# Altium integrated library OmniCore_SDR.IntLib: 98 symbols (part 2 of 2)
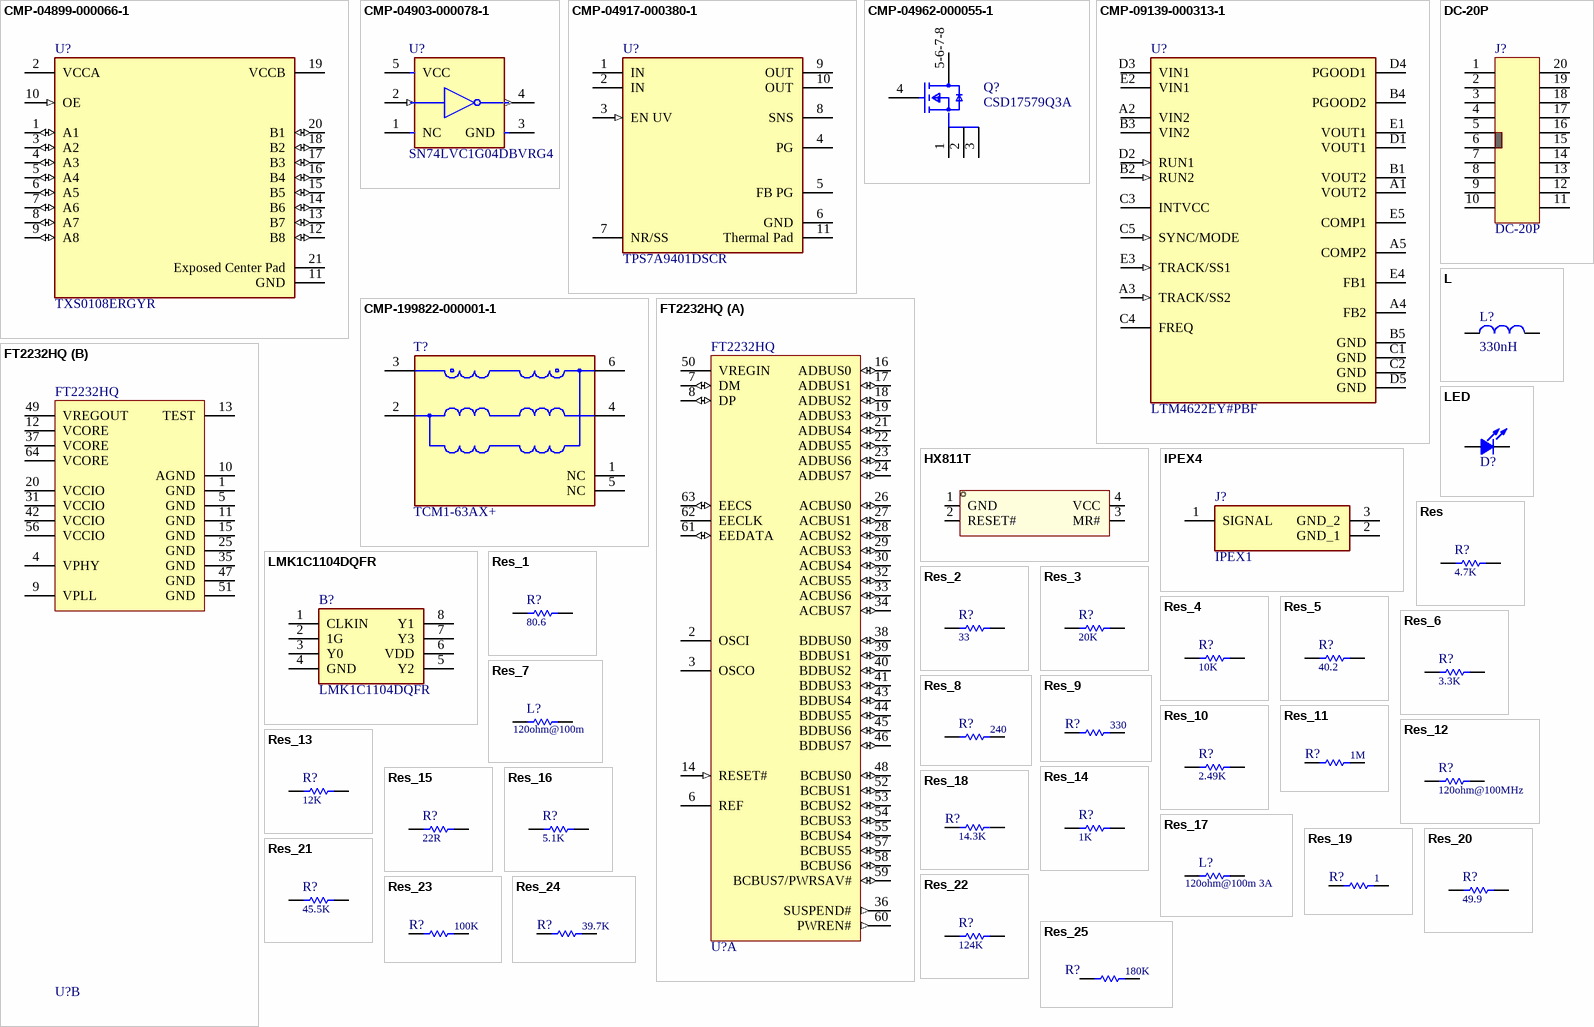
[diagram p5: symbols CMP-04899-000066-1 to Res_25]

## CMP-199822-000001-1
designator T?, comment TCM1-63AX+
1:1 CORE & WIRE Transformer, 10 - 6000 MHz, 50Ω; Manufacturer: Mini-Circuits; Insertion Loss: 1.16-1.8dB; Return Loss: 9.42-16.9dB; Lead Free: Yes; Device Class L3: unset; Temperature: -40°C to +85°C; Manufacturer Part Number: TCM1-63AX+; Frequency: 10-6000MHz; Device Class L2: Transformers; RoHS: TRUE; Octopart: https://octopart.com/tcm1-63ax%2B-mini-circuits-107315723; Temperature Range Low: -40°C; Category: Trans; Package: 0; ComponentLink2URL: https://www.minicircuits.com/pdfs/TCM1-63AX+.pdf; ComponentLink2Description: Datasheet; Automotive: No; Height: 4.06mm; Device Class L1: Passive Components; Temperature Range High: +85°C; Turns Ratio: 1:1
footprint FP-TCM1-63AX+-MFG
pins: 1 NC, 2 GND, 3 PRIMARY DOT, 4 SECONDARY, 5 NC, 6 SECONDARY DOT

## DC-20P
designator J?
footprint DC-20P
footprint HDR-TH_20P-P2.54-V-M-R2-C10-S2.54
pins: 1, 2, 3, 4, 5, 6, 7, 8, 9, 10, 11, 12, 13, 14, 15, 16, 17, 18, 19, 20

## FT2232HQ
designator U?
Dual High Speed USB to Multipurpose UART / FIFO IC / , 3 to 3.6 V, -40 to 85 degC, 64- Pin LQFP, RoHS; Manufacturer: FTDI; Number of Channels per Chip: 2; Standard Supported: RS232,RS422,RS485; Maximum Data Rate: 480Mbit/s; Package Description: 64-Pin Low-profile Quad Flat Package, Body 10 x 10 mm, Pitch 0.5 mm; Maximum Operating Temperature: +85°C; Mounting Technology: SurfaceMount; Pin Count: 64; Package Reference: LQFP-64; Manufacturer URL: http://www.nxp.com/; Length: 10mm; Width: 10mm; Minimum Operating Temperature: -40°C; Dimensions: 10x10x1.4mm; Package Type: LQFP; Mounting Type: SurfaceMount; Datasheet URL: http://www.ftdichip.com/Support/Documents/DataSheets/ICs/DS_FT2232H.pdf; Datasheet Version: Rev. 2.5, 07/2016; Height: 1.4mm
footprint QFN50P900X900X90-65N-D
part A pins: 2 OSCI "Oscillator input.", 3 OSCO "Oscillator output.", 6 REF "Current reference - connect via a 12Kohm resistor @ 1% to GND.", 7 DM (io) "USB Data Signal Minus.", 8 DP (io) "USB Data Signal Plus.", 14 RESET# (in) "Reset input (active low).", 16 ADBUS0 (io) "D0 bidirectional FIFO data", 17 ADBUS1 (io) "D1 bidirectional FIFO data", 18 ADBUS2 (io) "D2 bidirectional FIFO data", 19 ADBUS3 (io) "D3 bidirectional FIFO data", 21 ADBUS4 (io) "D4 bidirectional FIFO data", 22 ADBUS5 (io) "D5 bidirectional FIFO data", 23 ADBUS6 (io) "D6 bidirectional FIFO data", 24 ADBUS7 (io) "D7 bidirectional FIFO data", 26 ACBUS0 (io) "C0 bidirectional FIFO data", 27 ACBUS1 (io) "C1 bidirectional FIFO data", 28 ACBUS2 (io) "C2 bidirectional FIFO data", 29 ACBUS3 (io) "C3 bidirectional FIFO data", 30 ACBUS4 (io) "C4 bidirectional FIFO data", 32 ACBUS5 (io) "C5 bidirectional FIFO data", 33 ACBUS6 (io) "C6 bidirectional FIFO data", 34 ACBUS7 (io) "C7 bidirectional FIFO data", 36 SUSPEND# (out) "Active low when USB is in suspend mode.", 38 BDBUS0 (io) "D0 bidirectional FIFO data", 39 BDBUS1 (io) "D1 bidirectional FIFO data", 40 BDBUS2 (io) "D2 bidirectional FIFO data", 41 BDBUS3 (io) "D3 bidirectional FIFO data", 43 BDBUS4 (io) "D4 bidirectional FIFO data", 44 BDBUS5 (io) "D5 bidirectional FIFO data", 45 BDBUS6 (io) "D6 bidirectional FIFO data", 46 BDBUS7 (io) "D7 bidirectional FIFO data", 48 BCBUS0 (io) "C0 bidirectional FIFO data", 50 VREGIN (power) "+3.3V Input. Integrated 1.8V voltage regulator input.", 52 BCBUS1 (io) "C1 bidirectional FIFO data", 53 BCBUS2 (io) "C2 bidirectional FIFO data", 54 BCBUS3 (io) "C3 bidirectional FIFO data", 55 BCBUS4 (io) "C4 bidirectional FIFO data", 57 BCBUS5 (io) "C5 bidirectional FIFO data", 58 BCBUS6 (io) "C6 bidirectional FIFO data", 59 BCBUS7/PWRSAV# (io), 60 PWREN# (out) "Active low power-enable output.", 61 EEDATA (io) "EEPROM - Data I/O Connect directly to Data-In of the EEPROM and to Data-Out of the EEPROM via a 2.2K resistor. Also, pull Data-Out of the EEPROM to VCC via a 10K resistor for correct operation. Tri-State during device reset.", 62 EECLK (hiz) "Clock signal to EEPROM. Tri-State during device reset. When not in reset, this outputs the EEPROM clock.", 63 EECS (io) "EEPROM - Chip Select. Tri-State during device reset."
part B pins: 1 GND (power) "0V Ground input.", 4 VPHY (power) "+3.3V Input. Internal USB PHY power supply input. Note that this cannot be connected directly to the USB supply. A +3.3V regulator must be used. It is recommended that this supply is filtered using an LC filter.", 5 GND (power) "0V Ground input.", 9 VPLL (power) "+3.3V input. Internal PHY PLL power supply input. It is recommended that this supply is filtered using an LC filter.", 10 AGND (power) "0V Analog ground.", 11 GND (power) "0V Ground input.", 12 VCORE (power) "+1.8V input. Core supply voltage input.", 13 TEST "IC test pin - for normal operation should be connected to GND.", 15 GND (power) "0V Ground input.", 20 VCCIO (power) "+3.3V input. I/O interface power supply input. Failure to connect all VCCIO pins will result in failure of the device.", 25 GND (power) "0V Ground input.", 31 VCCIO (power) "+3.3V input. I/O interface power supply input. Failure to connect all VCCIO pins will result in failure of the device.", 35 GND (power) "0V Ground input.", 37 VCORE (power) "+1.8V input. Core supply voltage input.", 42 VCCIO (power) "+3.3V input. I/O interface power supply input. Failure to connect all VCCIO pins will result in failure of the device.", 47 GND (power) "0V Ground input.", 49 VREGOUT (power) "+1.8V Output. Integrated voltage regulator output. Connect to VCORE with 3.3uF filter capacitor.", 51 GND (power) "0V Ground input.", 56 VCCIO (power) "+3.3V input. I/O interface power supply input. Failure to connect all VCCIO pins will result in failure of the device.", 64 VCORE (power) "+1.8V input. Core supply voltage input."

## HX811T
designator U?  (value not drawn)
Manufacturer: HX(恒佳兴); Add into BOM: yes; Symbol: HX811T; Device: HX811T; LCSC Part Name: 检测复位IC  HX811T; Supplier Part: C296128; Manufacturer Part: HX811T; Supplier Footprint: SOT-143; JLCPCB Part Class: Extended Part; Datasheet: https://atta.szlcsc.com/upload/public/pdf/source/20181119/C296130_13C074D56463349345A6B8D040F0FFA0.pdf; Supplier: LCSC; Convert to PCB: yes
footprint SOT-143_L2.9-W1.3-P1.92-LS2.3-BL
pins: 1 GND, 2 RESET#, 3 MR#, 4 VCC

## IPEX4
designator J?, comment IPEX1
footprint 20279-001E (贴片天线座)
pins: 1 SIGNAL, 2 GND_1, 3 GND_2

## L
designator L?, comment 330nH
footprint L
footprint L-DIP
footprint L0805 (贴片电感0805)
footprint L0603 (贴片电感0603 (1608)  低密度)
footprint L-1210
footprint L0402
pins: 1, 2

## LED
designator D?  (value not drawn)
发光二极管
footprint Led-0805_L (贴片LED0805-高密度)
footprint Led-0805_M (贴片LED0805-低密度)
footprint LED_0603_L
footprint LED-1206 (贴片元件)
footprint LED-3528 (贴片LED)
footprint LED-RGB (三基色二极管)
footprint LED_DIP_B (5mm)
footprint LED_Dip_G (5mm)
footprint LED_Dip_R (5mm)
footprint LED_Dip_Y (5mm)
pins: 1, 2

## LMK1C1104DQFR
designator B?
Clock Buffer 4-channel output LVC MOS 1.8-V buffer; Manufacturer_Name: Texas Instruments; Geometry.Height: 0.8mm; Manufacturer_Part_Number: LMK1C1104DQFR; Mouser Part Number: 595-LMK1C1104DQFR; Mouser Price/Stock: https://www.mouser.co.uk/ProductDetail/Texas-Instruments/LMK1C1104DQFR?qs=QNEnbhJQKvYdwt0bSAj%252Blw%3D%3D; Arrow Part Number: LMK1C1104DQFR; Arrow Price/Stock: https://www.arrow.com/en/products/lmk1c1104dqfr/texas-instruments?utm_currency=USD&region=nac; Datasheet Link: https://www.ti.com/lit/ds/symlink/lmk1c1104.pdf?ts=1625794058723&ref_url=https%253A%252F%252Fwww.ti.com%252Fproduct%252FLMK1C1104
footprint SON50P200X200X80-8N
pins: 1 CLKIN, 2 1G, 3 Y0, 4 GND, 5 Y2, 6 VDD, 7 Y3, 8 Y1

## Res
designator R?, comment value 4.7K  (hidden comment: R)
贴片电阻
footprint R0603-L (贴片电阻0603 高密度)
footprint R0402-M (贴片电阻 0402(1005)  低密度)
footprint R0402-L (贴片电阻0402, Body 1.0x0.5mm, 高密度)
footprint R0603-M (贴片电阻0603 (1608)  低密度)
footprint R0805-L (贴片电阻0805-高密度)
footprint R0805-M (贴片电阻0805-低密度)
footprint R1206-L (Register1206 (3216) for Startronics  高密度)
footprint R1206-M (贴片电阻1206  低密度)
footprint R1210-L (1210 Register SMD - Startronics  高密度)
footprint R1210-M (贴片电阻1210  低密度)
footprint R1812 (贴片元件)
footprint R2010 (贴片元件)
footprint R2512 (贴片元件)
pins: 1, 2

## Res_1
designator R?, comment value 80.6  (hidden comment: R)
贴片电阻
footprint R0603-L (贴片电阻0603 高密度)
footprint R0402-M (贴片电阻 0402(1005)  低密度)
footprint R0402-L (贴片电阻0402, Body 1.0x0.5mm, 高密度)
footprint R0603-M (贴片电阻0603 (1608)  低密度)
footprint R0805-L (贴片电阻0805-高密度)
footprint R0805-M (贴片电阻0805-低密度)
footprint R1206-L (Register1206 (3216) for Startronics  高密度)
footprint R1206-M (贴片电阻1206  低密度)
footprint R1210-L (1210 Register SMD - Startronics  高密度)
footprint R1210-M (贴片电阻1210  低密度)
footprint R1812 (贴片元件)
footprint R2010 (贴片元件)
footprint R2512 (贴片元件)
footprint R0402-S (C0402)
pins: 1, 2

## Res_2
designator R?, comment value 33  (hidden comment: R)
贴片电阻
footprint R0603-L (贴片电阻0603 高密度)
footprint R0402-M (贴片电阻 0402(1005)  低密度)
footprint R0402-L (贴片电阻0402, Body 1.0x0.5mm, 高密度)
footprint R0603-M (贴片电阻0603 (1608)  低密度)
footprint R0805-L (贴片电阻0805-高密度)
footprint R0805-M (贴片电阻0805-低密度)
footprint R1206-L (Register1206 (3216) for Startronics  高密度)
footprint R1206-M (贴片电阻1206  低密度)
footprint R1210-L (1210 Register SMD - Startronics  高密度)
footprint R1210-M (贴片电阻1210  低密度)
footprint R1812 (贴片元件)
footprint R2010 (贴片元件)
footprint R2512 (贴片元件)
pins: 1, 2

## Res_3
designator R?, comment value 20K  (hidden comment: R)
贴片电阻
footprint R0603-L (贴片电阻0603 高密度)
footprint R0402-M (贴片电阻 0402(1005)  低密度)
footprint R0402-L (贴片电阻0402, Body 1.0x0.5mm, 高密度)
footprint R0603-M (贴片电阻0603 (1608)  低密度)
footprint R0805-L (贴片电阻0805-高密度)
footprint R0805-M (贴片电阻0805-低密度)
footprint R1206-L (Register1206 (3216) for Startronics  高密度)
footprint R1206-M (贴片电阻1206  低密度)
footprint R1210-L (1210 Register SMD - Startronics  高密度)
footprint R1210-M (贴片电阻1210  低密度)
footprint R1812 (贴片元件)
footprint R2010 (贴片元件)
footprint R2512 (贴片元件)
pins: 1, 2

## Res_4
designator R?, comment value 10K  (hidden comment: R)
贴片电阻
footprint R0603-L (贴片电阻0603 高密度)
footprint R0402-M (贴片电阻 0402(1005)  低密度)
footprint R0402-L (贴片电阻0402, Body 1.0x0.5mm, 高密度)
footprint R0603-M (贴片电阻0603 (1608)  低密度)
footprint R0805-L (贴片电阻0805-高密度)
footprint R0805-M (贴片电阻0805-低密度)
footprint R1206-L (Register1206 (3216) for Startronics  高密度)
footprint R1206-M (贴片电阻1206  低密度)
footprint R1210-L (1210 Register SMD - Startronics  高密度)
footprint R1210-M (贴片电阻1210  低密度)
footprint R1812 (贴片元件)
footprint R2010 (贴片元件)
footprint R2512 (贴片元件)
pins: 1, 2

## Res_5
designator R?, comment value 40.2  (hidden comment: R)
贴片电阻
footprint R0603-L (贴片电阻0603 高密度)
footprint R0402-M (贴片电阻 0402(1005)  低密度)
footprint R0402-L (贴片电阻0402, Body 1.0x0.5mm, 高密度)
footprint R0603-M (贴片电阻0603 (1608)  低密度)
footprint R0805-L (贴片电阻0805-高密度)
footprint R0805-M (贴片电阻0805-低密度)
footprint R1206-L (Register1206 (3216) for Startronics  高密度)
footprint R1206-M (贴片电阻1206  低密度)
footprint R1210-L (1210 Register SMD - Startronics  高密度)
footprint R1210-M (贴片电阻1210  低密度)
footprint R1812 (贴片元件)
footprint R2010 (贴片元件)
footprint R2512 (贴片元件)
pins: 1, 2

## Res_6
designator R?, comment value 3.3K  (hidden comment: R)
贴片电阻
footprint R0603-L (贴片电阻0603 高密度)
footprint R0402-M (贴片电阻 0402(1005)  低密度)
footprint R0402-L (贴片电阻0402, Body 1.0x0.5mm, 高密度)
footprint R0603-M (贴片电阻0603 (1608)  低密度)
footprint R0805-L (贴片电阻0805-高密度)
footprint R0805-M (贴片电阻0805-低密度)
footprint R1206-L (Register1206 (3216) for Startronics  高密度)
footprint R1206-M (贴片电阻1206  低密度)
footprint R1210-L (1210 Register SMD - Startronics  高密度)
footprint R1210-M (贴片电阻1210  低密度)
footprint R1812 (贴片元件)
footprint R2010 (贴片元件)
footprint R2512 (贴片元件)
pins: 1, 2

## Res_7
designator L?, comment value 120ohm@100m  (hidden comment: R)
贴片电阻
footprint R0603-L (贴片电阻0603 高密度)
footprint R0402-M (贴片电阻 0402(1005)  低密度)
footprint R0402-L (贴片电阻0402, Body 1.0x0.5mm, 高密度)
footprint R0603-M (贴片电阻0603 (1608)  低密度)
footprint R0805-L (贴片电阻0805-高密度)
footprint R0805-M (贴片电阻0805-低密度)
footprint R1206-L (Register1206 (3216) for Startronics  高密度)
footprint R1206-M (贴片电阻1206  低密度)
footprint R1210-L (1210 Register SMD - Startronics  高密度)
footprint R1210-M (贴片电阻1210  低密度)
footprint R1812 (贴片元件)
footprint R2010 (贴片元件)
footprint R2512 (贴片元件)
pins: 1, 2

## Res_8
designator R?, comment value 240  (hidden comment: R)
贴片电阻
footprint R0603-L (贴片电阻0603 高密度)
footprint R0402-M (贴片电阻 0402(1005)  低密度)
footprint R0402-L (贴片电阻0402, Body 1.0x0.5mm, 高密度)
footprint R0603-M (贴片电阻0603 (1608)  低密度)
footprint R0805-L (贴片电阻0805-高密度)
footprint R0805-M (贴片电阻0805-低密度)
footprint R1206-L (Register1206 (3216) for Startronics  高密度)
footprint R1206-M (贴片电阻1206  低密度)
footprint R1210-L (1210 Register SMD - Startronics  高密度)
footprint R1210-M (贴片电阻1210  低密度)
footprint R1812 (贴片元件)
footprint R2010 (贴片元件)
footprint R2512 (贴片元件)
pins: 1, 2

## Res_9
designator R?, comment value 330  (hidden comment: R)
贴片电阻
footprint R0603-L (贴片电阻0603 高密度)
footprint R0402-M (贴片电阻 0402(1005)  低密度)
footprint R0402-L (贴片电阻0402, Body 1.0x0.5mm, 高密度)
footprint R0603-M (贴片电阻0603 (1608)  低密度)
footprint R0805-L (贴片电阻0805-高密度)
footprint R0805-M (贴片电阻0805-低密度)
footprint R1206-L (Register1206 (3216) for Startronics  高密度)
footprint R1206-M (贴片电阻1206  低密度)
footprint R1210-L (1210 Register SMD - Startronics  高密度)
footprint R1210-M (贴片电阻1210  低密度)
footprint R1812 (贴片元件)
footprint R2010 (贴片元件)
footprint R2512 (贴片元件)
pins: 1, 2

## Res_10
designator R?, comment value 2.49K  (hidden comment: R)
贴片电阻
footprint R0603-L (贴片电阻0603 高密度)
footprint R0402-M (贴片电阻 0402(1005)  低密度)
footprint R0402-L (贴片电阻0402, Body 1.0x0.5mm, 高密度)
footprint R0603-M (贴片电阻0603 (1608)  低密度)
footprint R0805-L (贴片电阻0805-高密度)
footprint R0805-M (贴片电阻0805-低密度)
footprint R1206-L (Register1206 (3216) for Startronics  高密度)
footprint R1206-M (贴片电阻1206  低密度)
footprint R1210-L (1210 Register SMD - Startronics  高密度)
footprint R1210-M (贴片电阻1210  低密度)
footprint R1812 (贴片元件)
footprint R2010 (贴片元件)
footprint R2512 (贴片元件)
pins: 1, 2

## Res_11
designator R?, comment value 1M  (hidden comment: R)
贴片电阻
footprint R0603-L (贴片电阻0603 高密度)
footprint R0402-M (贴片电阻 0402(1005)  低密度)
footprint R0402-L (贴片电阻0402, Body 1.0x0.5mm, 高密度)
footprint R0603-M (贴片电阻0603 (1608)  低密度)
footprint R0805-L (贴片电阻0805-高密度)
footprint R0805-M (贴片电阻0805-低密度)
footprint R1206-L (Register1206 (3216) for Startronics  高密度)
footprint R1206-M (贴片电阻1206  低密度)
footprint R1210-L (1210 Register SMD - Startronics  高密度)
footprint R1210-M (贴片电阻1210  低密度)
footprint R1812 (贴片元件)
footprint R2010 (贴片元件)
footprint R2512 (贴片元件)
pins: 1, 2

## Res_12
designator R?, comment value 120ohm@100MHz  (hidden comment: R)
贴片电阻
footprint R0603-L (贴片电阻0603 高密度)
footprint R0402-M (贴片电阻 0402(1005)  低密度)
footprint R0402-L (贴片电阻0402, Body 1.0x0.5mm, 高密度)
footprint R0603-M (贴片电阻0603 (1608)  低密度)
footprint R0805-L (贴片电阻0805-高密度)
footprint R0805-M (贴片电阻0805-低密度)
footprint R1206-L (Register1206 (3216) for Startronics  高密度)
footprint R1206-M (贴片电阻1206  低密度)
footprint R1210-L (1210 Register SMD - Startronics  高密度)
footprint R1210-M (贴片电阻1210  低密度)
footprint R1812 (贴片元件)
footprint R2010 (贴片元件)
footprint R2512 (贴片元件)
pins: 1, 2

## Res_13
designator R?, comment value 12K  (hidden comment: R)
贴片电阻
footprint R0603-L (贴片电阻0603 高密度)
footprint R0402-M (贴片电阻 0402(1005)  低密度)
footprint R0402-L (贴片电阻0402, Body 1.0x0.5mm, 高密度)
footprint R0603-M (贴片电阻0603 (1608)  低密度)
footprint R0805-L (贴片电阻0805-高密度)
footprint R0805-M (贴片电阻0805-低密度)
footprint R1206-L (Register1206 (3216) for Startronics  高密度)
footprint R1206-M (贴片电阻1206  低密度)
footprint R1210-L (1210 Register SMD - Startronics  高密度)
footprint R1210-M (贴片电阻1210  低密度)
footprint R1812 (贴片元件)
footprint R2010 (贴片元件)
footprint R2512 (贴片元件)
pins: 1, 2

## Res_14
designator R?, comment value 1K  (hidden comment: R)
贴片电阻
footprint R0603-L (贴片电阻0603 高密度)
footprint R0402-M (贴片电阻 0402(1005)  低密度)
footprint R0402-L (贴片电阻0402, Body 1.0x0.5mm, 高密度)
footprint R0603-M (贴片电阻0603 (1608)  低密度)
footprint R0805-L (贴片电阻0805-高密度)
footprint R0805-M (贴片电阻0805-低密度)
footprint R1206-L (Register1206 (3216) for Startronics  高密度)
footprint R1206-M (贴片电阻1206  低密度)
footprint R1210-L (1210 Register SMD - Startronics  高密度)
footprint R1210-M (贴片电阻1210  低密度)
footprint R1812 (贴片元件)
footprint R2010 (贴片元件)
footprint R2512 (贴片元件)
pins: 1, 2

## Res_15
designator R?, comment value 22R  (hidden comment: R)
贴片电阻
footprint R0603-L (贴片电阻0603 高密度)
footprint R0402-M (贴片电阻 0402(1005)  低密度)
footprint R0402-L (贴片电阻0402, Body 1.0x0.5mm, 高密度)
footprint R0603-M (贴片电阻0603 (1608)  低密度)
footprint R0805-L (贴片电阻0805-高密度)
footprint R0805-M (贴片电阻0805-低密度)
footprint R1206-L (Register1206 (3216) for Startronics  高密度)
footprint R1206-M (贴片电阻1206  低密度)
footprint R1210-L (1210 Register SMD - Startronics  高密度)
footprint R1210-M (贴片电阻1210  低密度)
footprint R1812 (贴片元件)
footprint R2010 (贴片元件)
footprint R2512 (贴片元件)
pins: 1, 2

## Res_16
designator R?, comment value 5.1K  (hidden comment: R)
贴片电阻
footprint R0603-L (贴片电阻0603 高密度)
footprint R0402-M (贴片电阻 0402(1005)  低密度)
footprint R0402-L (贴片电阻0402, Body 1.0x0.5mm, 高密度)
footprint R0603-M (贴片电阻0603 (1608)  低密度)
footprint R0805-L (贴片电阻0805-高密度)
footprint R0805-M (贴片电阻0805-低密度)
footprint R1206-L (Register1206 (3216) for Startronics  高密度)
footprint R1206-M (贴片电阻1206  低密度)
footprint R1210-L (1210 Register SMD - Startronics  高密度)
footprint R1210-M (贴片电阻1210  低密度)
footprint R1812 (贴片元件)
footprint R2010 (贴片元件)
footprint R2512 (贴片元件)
pins: 1, 2

## Res_17
designator L?, comment value 120ohm@100m 3A  (hidden comment: R)
贴片电阻
footprint R0603-L (贴片电阻0603 高密度)
footprint R0402-M (贴片电阻 0402(1005)  低密度)
footprint R0402-L (贴片电阻0402, Body 1.0x0.5mm, 高密度)
footprint R0603-M (贴片电阻0603 (1608)  低密度)
footprint R0805-L (贴片电阻0805-高密度)
footprint R0805-M (贴片电阻0805-低密度)
footprint R1206-L (Register1206 (3216) for Startronics  高密度)
footprint R1206-M (贴片电阻1206  低密度)
footprint R1210-L (1210 Register SMD - Startronics  高密度)
footprint R1210-M (贴片电阻1210  低密度)
footprint R1812 (贴片元件)
footprint R2010 (贴片元件)
footprint R2512 (贴片元件)
pins: 1, 2

## Res_18
designator R?, comment value 14.3K  (hidden comment: R)
贴片电阻
footprint R0603-L (贴片电阻0603 高密度)
footprint R0402-M (贴片电阻 0402(1005)  低密度)
footprint R0402-L (贴片电阻0402, Body 1.0x0.5mm, 高密度)
footprint R0603-M (贴片电阻0603 (1608)  低密度)
footprint R0805-L (贴片电阻0805-高密度)
footprint R0805-M (贴片电阻0805-低密度)
footprint R1206-L (Register1206 (3216) for Startronics  高密度)
footprint R1206-M (贴片电阻1206  低密度)
footprint R1210-L (1210 Register SMD - Startronics  高密度)
footprint R1210-M (贴片电阻1210  低密度)
footprint R1812 (贴片元件)
footprint R2010 (贴片元件)
footprint R2512 (贴片元件)
pins: 1, 2

## Res_19
designator R?, comment value 1  (hidden comment: R)
贴片电阻
footprint R0603-L (贴片电阻0603 高密度)
footprint R0402-M (贴片电阻 0402(1005)  低密度)
footprint R0402-L (贴片电阻0402, Body 1.0x0.5mm, 高密度)
footprint R0603-M (贴片电阻0603 (1608)  低密度)
footprint R0805-L (贴片电阻0805-高密度)
footprint R0805-M (贴片电阻0805-低密度)
footprint R1206-L (Register1206 (3216) for Startronics  高密度)
footprint R1206-M (贴片电阻1206  低密度)
footprint R1210-L (1210 Register SMD - Startronics  高密度)
footprint R1210-M (贴片电阻1210  低密度)
footprint R1812 (贴片元件)
footprint R2010 (贴片元件)
footprint R2512 (贴片元件)
pins: 1, 2

## Res_20
designator R?, comment value 49.9  (hidden comment: R)
贴片电阻
footprint R0603-L (贴片电阻0603 高密度)
footprint R0402-M (贴片电阻 0402(1005)  低密度)
footprint R0402-L (贴片电阻0402, Body 1.0x0.5mm, 高密度)
footprint R0603-M (贴片电阻0603 (1608)  低密度)
footprint R0805-L (贴片电阻0805-高密度)
footprint R0805-M (贴片电阻0805-低密度)
footprint R1206-L (Register1206 (3216) for Startronics  高密度)
footprint R1206-M (贴片电阻1206  低密度)
footprint R1210-L (1210 Register SMD - Startronics  高密度)
footprint R1210-M (贴片电阻1210  低密度)
footprint R1812 (贴片元件)
footprint R2010 (贴片元件)
footprint R2512 (贴片元件)
pins: 1, 2

## Res_21
designator R?, comment value 45.5K  (hidden comment: R)
贴片电阻
footprint R0603-L (贴片电阻0603 高密度)
footprint R0402-M (贴片电阻 0402(1005)  低密度)
footprint R0402-L (贴片电阻0402, Body 1.0x0.5mm, 高密度)
footprint R0603-M (贴片电阻0603 (1608)  低密度)
footprint R0805-L (贴片电阻0805-高密度)
footprint R0805-M (贴片电阻0805-低密度)
footprint R1206-L (Register1206 (3216) for Startronics  高密度)
footprint R1206-M (贴片电阻1206  低密度)
footprint R1210-L (1210 Register SMD - Startronics  高密度)
footprint R1210-M (贴片电阻1210  低密度)
footprint R1812 (贴片元件)
footprint R2010 (贴片元件)
footprint R2512 (贴片元件)
pins: 1, 2

## Res_22
designator R?, comment value 124K  (hidden comment: R)
贴片电阻
footprint R0603-L (贴片电阻0603 高密度)
footprint R0402-M (贴片电阻 0402(1005)  低密度)
footprint R0402-L (贴片电阻0402, Body 1.0x0.5mm, 高密度)
footprint R0603-M (贴片电阻0603 (1608)  低密度)
footprint R0805-L (贴片电阻0805-高密度)
footprint R0805-M (贴片电阻0805-低密度)
footprint R1206-L (Register1206 (3216) for Startronics  高密度)
footprint R1206-M (贴片电阻1206  低密度)
footprint R1210-L (1210 Register SMD - Startronics  高密度)
footprint R1210-M (贴片电阻1210  低密度)
footprint R1812 (贴片元件)
footprint R2010 (贴片元件)
footprint R2512 (贴片元件)
pins: 1, 2

## Res_23
designator R?, comment value 100K  (hidden comment: R)
贴片电阻
footprint R0603-L (贴片电阻0603 高密度)
footprint R0402-M (贴片电阻 0402(1005)  低密度)
footprint R0402-L (贴片电阻0402, Body 1.0x0.5mm, 高密度)
footprint R0603-M (贴片电阻0603 (1608)  低密度)
footprint R0805-L (贴片电阻0805-高密度)
footprint R0805-M (贴片电阻0805-低密度)
footprint R1206-L (Register1206 (3216) for Startronics  高密度)
footprint R1206-M (贴片电阻1206  低密度)
footprint R1210-L (1210 Register SMD - Startronics  高密度)
footprint R1210-M (贴片电阻1210  低密度)
footprint R1812 (贴片元件)
footprint R2010 (贴片元件)
footprint R2512 (贴片元件)
pins: 1, 2

## Res_24
designator R?, comment value 39.7K  (hidden comment: R)
贴片电阻
footprint R0603-L (贴片电阻0603 高密度)
footprint R0402-M (贴片电阻 0402(1005)  低密度)
footprint R0402-L (贴片电阻0402, Body 1.0x0.5mm, 高密度)
footprint R0603-M (贴片电阻0603 (1608)  低密度)
footprint R0805-L (贴片电阻0805-高密度)
footprint R0805-M (贴片电阻0805-低密度)
footprint R1206-L (Register1206 (3216) for Startronics  高密度)
footprint R1206-M (贴片电阻1206  低密度)
footprint R1210-L (1210 Register SMD - Startronics  高密度)
footprint R1210-M (贴片电阻1210  低密度)
footprint R1812 (贴片元件)
footprint R2010 (贴片元件)
footprint R2512 (贴片元件)
pins: 1, 2

## Res_25
designator R?, comment value 180K  (hidden comment: R)
贴片电阻
footprint R0603-L (贴片电阻0603 高密度)
footprint R0402-M (贴片电阻 0402(1005)  低密度)
footprint R0402-L (贴片电阻0402, Body 1.0x0.5mm, 高密度)
footprint R0603-M (贴片电阻0603 (1608)  低密度)
footprint R0805-L (贴片电阻0805-高密度)
footprint R0805-M (贴片电阻0805-低密度)
footprint R1206-L (Register1206 (3216) for Startronics  高密度)
footprint R1206-M (贴片电阻1206  低密度)
footprint R1210-L (1210 Register SMD - Startronics  高密度)
footprint R1210-M (贴片电阻1210  低密度)
footprint R1812 (贴片元件)
footprint R2010 (贴片元件)
footprint R2512 (贴片元件)
pins: 1, 2

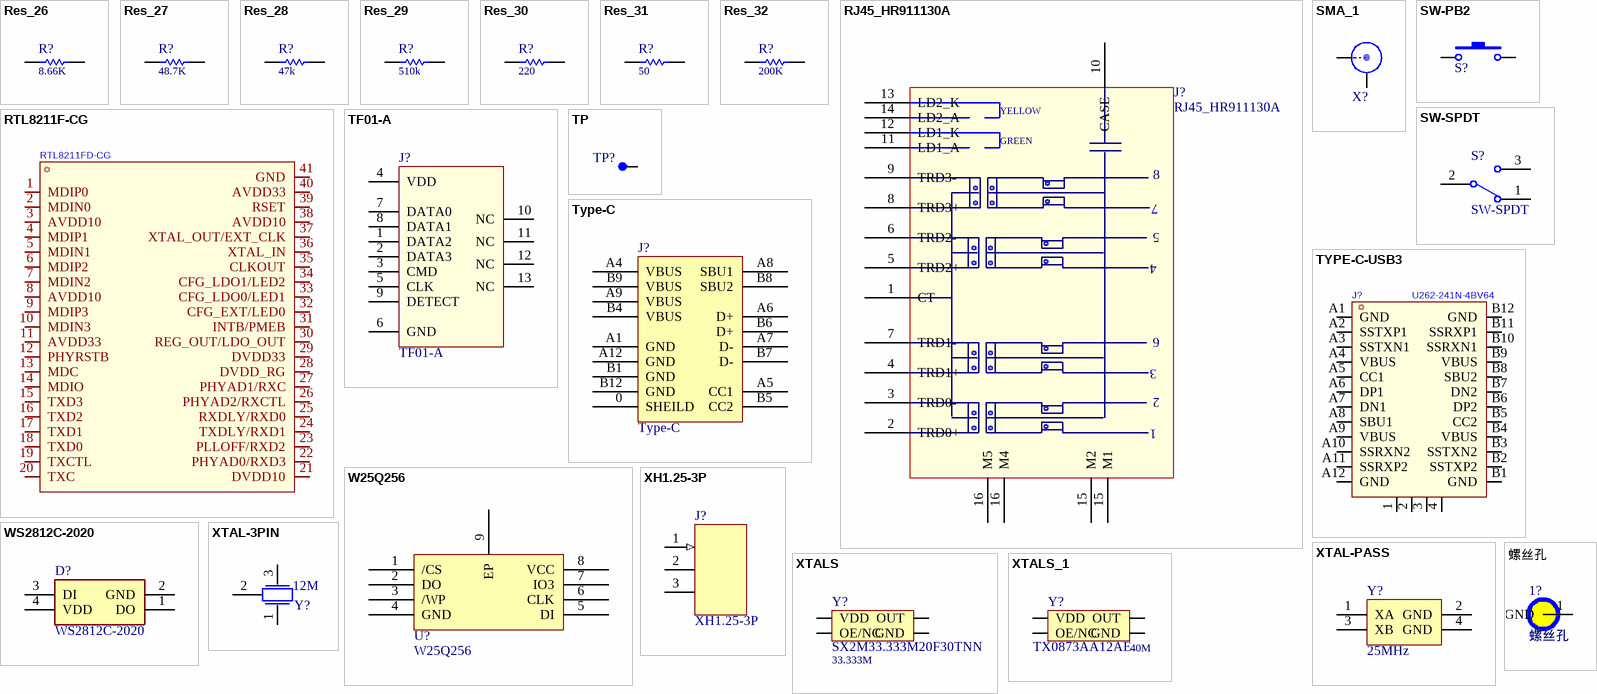
[diagram p4: symbols Res_26 to 螺丝孔]

## Res_26
designator R?, comment value 8.66K  (hidden comment: R)
贴片电阻
footprint R0603-L (贴片电阻0603 高密度)
footprint R0402-M (贴片电阻 0402(1005)  低密度)
footprint R0402-L (贴片电阻0402, Body 1.0x0.5mm, 高密度)
footprint R0603-M (贴片电阻0603 (1608)  低密度)
footprint R0805-L (贴片电阻0805-高密度)
footprint R0805-M (贴片电阻0805-低密度)
footprint R1206-L (Register1206 (3216) for Startronics  高密度)
footprint R1206-M (贴片电阻1206  低密度)
footprint R1210-L (1210 Register SMD - Startronics  高密度)
footprint R1210-M (贴片电阻1210  低密度)
footprint R1812 (贴片元件)
footprint R2010 (贴片元件)
footprint R2512 (贴片元件)
pins: 1, 2

## Res_27
designator R?, comment value 48.7K  (hidden comment: R)
贴片电阻
footprint R0603-L (贴片电阻0603 高密度)
footprint R0402-M (贴片电阻 0402(1005)  低密度)
footprint R0402-L (贴片电阻0402, Body 1.0x0.5mm, 高密度)
footprint R0603-M (贴片电阻0603 (1608)  低密度)
footprint R0805-L (贴片电阻0805-高密度)
footprint R0805-M (贴片电阻0805-低密度)
footprint R1206-L (Register1206 (3216) for Startronics  高密度)
footprint R1206-M (贴片电阻1206  低密度)
footprint R1210-L (1210 Register SMD - Startronics  高密度)
footprint R1210-M (贴片电阻1210  低密度)
footprint R1812 (贴片元件)
footprint R2010 (贴片元件)
footprint R2512 (贴片元件)
pins: 1, 2

## Res_28
designator R?, comment value 47k  (hidden comment: R)
贴片电阻
footprint R0603-L (贴片电阻0603 高密度)
footprint R0402-M (贴片电阻 0402(1005)  低密度)
footprint R0402-L (贴片电阻0402, Body 1.0x0.5mm, 高密度)
footprint R0603-M (贴片电阻0603 (1608)  低密度)
footprint R0805-L (贴片电阻0805-高密度)
footprint R0805-M (贴片电阻0805-低密度)
footprint R1206-L (Register1206 (3216) for Startronics  高密度)
footprint R1206-M (贴片电阻1206  低密度)
footprint R1210-L (1210 Register SMD - Startronics  高密度)
footprint R1210-M (贴片电阻1210  低密度)
footprint R1812 (贴片元件)
footprint R2010 (贴片元件)
footprint R2512 (贴片元件)
pins: 1, 2

## Res_29
designator R?, comment value 510k  (hidden comment: R)
贴片电阻
footprint R0603-L (贴片电阻0603 高密度)
footprint R0402-M (贴片电阻 0402(1005)  低密度)
footprint R0402-L (贴片电阻0402, Body 1.0x0.5mm, 高密度)
footprint R0603-M (贴片电阻0603 (1608)  低密度)
footprint R0805-L (贴片电阻0805-高密度)
footprint R0805-M (贴片电阻0805-低密度)
footprint R1206-L (Register1206 (3216) for Startronics  高密度)
footprint R1206-M (贴片电阻1206  低密度)
footprint R1210-L (1210 Register SMD - Startronics  高密度)
footprint R1210-M (贴片电阻1210  低密度)
footprint R1812 (贴片元件)
footprint R2010 (贴片元件)
footprint R2512 (贴片元件)
pins: 1, 2

## Res_30
designator R?, comment value 220  (hidden comment: R)
贴片电阻
footprint R0603-L (贴片电阻0603 高密度)
footprint R0402-M (贴片电阻 0402(1005)  低密度)
footprint R0402-L (贴片电阻0402, Body 1.0x0.5mm, 高密度)
footprint R0603-M (贴片电阻0603 (1608)  低密度)
footprint R0805-L (贴片电阻0805-高密度)
footprint R0805-M (贴片电阻0805-低密度)
footprint R1206-L (Register1206 (3216) for Startronics  高密度)
footprint R1206-M (贴片电阻1206  低密度)
footprint R1210-L (1210 Register SMD - Startronics  高密度)
footprint R1210-M (贴片电阻1210  低密度)
footprint R1812 (贴片元件)
footprint R2010 (贴片元件)
footprint R2512 (贴片元件)
pins: 1, 2

## Res_31
designator R?, comment value 50  (hidden comment: R)
贴片电阻
footprint R0603-L (贴片电阻0603 高密度)
footprint R0402-M (贴片电阻 0402(1005)  低密度)
footprint R0402-L (贴片电阻0402, Body 1.0x0.5mm, 高密度)
footprint R0603-M (贴片电阻0603 (1608)  低密度)
footprint R0805-L (贴片电阻0805-高密度)
footprint R0805-M (贴片电阻0805-低密度)
footprint R1206-L (Register1206 (3216) for Startronics  高密度)
footprint R1206-M (贴片电阻1206  低密度)
footprint R1210-L (1210 Register SMD - Startronics  高密度)
footprint R1210-M (贴片电阻1210  低密度)
footprint R1812 (贴片元件)
footprint R2010 (贴片元件)
footprint R2512 (贴片元件)
pins: 1, 2

## Res_32
designator R?, comment value 200K  (hidden comment: R)
贴片电阻
footprint R0603-L (贴片电阻0603 高密度)
footprint R0402-M (贴片电阻 0402(1005)  低密度)
footprint R0402-L (贴片电阻0402, Body 1.0x0.5mm, 高密度)
footprint R0603-M (贴片电阻0603 (1608)  低密度)
footprint R0805-L (贴片电阻0805-高密度)
footprint R0805-M (贴片电阻0805-低密度)
footprint R1206-L (Register1206 (3216) for Startronics  高密度)
footprint R1206-M (贴片电阻1206  低密度)
footprint R1210-L (1210 Register SMD - Startronics  高密度)
footprint R1210-M (贴片电阻1210  低密度)
footprint R1812 (贴片元件)
footprint R2010 (贴片元件)
footprint R2512 (贴片元件)
pins: 1, 2

## RJ45_HR911130A
designator J?
footprint RJ45-TH_HR911130A
pins: 1 CT, 2 TRD0+, 3 TRD0-, 4 TRD1+, 5 TRD2+, 6 TRD2-, 7 TRD1-, 8 TRD3+, 9 TRD3-, 10 CASE, 11 LD1_A, 12 LD1_K, 13 LD2_K, 14 LD2_A, 15 M2, 15 M1, 16 M5, 16 M4
text: YELLOW; GREEN

## RTL8211F-CG
designator U?, comment RTL8211FD-CG
Manufacturer: REALTEK(瑞昱); Symbol: RTL8211F-CG; Add into BOM: yes; Number of Channels: 4; Interface: RGMII; Supply Voltage: 1.8V；2.5V；3.3V；1.5V; Device: RTL8211F-CG; LCSC Part Name: 集成10/100/1000M以太网精密收发器; Supplier Part: C187932; Manufacturer Part: RTL8211F-CG; Supplier Footprint: WQFN-40-EP(5x5); JLCPCB Part Class: Extended Part; Datasheet: https://atta.szlcsc.com/upload/public/pdf/source/20190902/C187932_1913F3711F05FE1324DF2946D70D648D.pdf; Supplier: LCSC; Convert to PCB: yes; Application Function: -
footprint WQFN-40_L5.0-W5.0-P0.4-BL-EP
pins: 1 MDIP0, 2 MDIN0, 3 AVDD10, 4 MDIP1, 5 MDIN1, 6 MDIP2, 7 MDIN2, 8 AVDD10, 9 MDIP3, 10 MDIN3, 11 AVDD33, 12 PHYRSTB, 13 MDC, 14 MDIO, 15 TXD3, 16 TXD2, 17 TXD1, 18 TXD0, 19 TXCTL, 20 TXC, 21 DVDD10, 22 PHYAD0/RXD3, 23 PLLOFF/RXD2, 24 TXDLY/RXD1, 25 RXDLY/RXD0, 26 PHYAD2/RXCTL, 27 PHYAD1/RXC, 28 DVDD_RG, 29 DVDD33, 30 REG_OUT/LDO_OUT, 31 INTB/PMEB, 32 CFG_EXT/LED0, 33 CFG_LDO0/LED1, 34 CFG_LDO1/LED2, 35 CLKOUT, 36 XTAL_IN, 37 XTAL_OUT/EXT_CLK, 38 AVDD10, 39 RSET, 40 AVDD33, 41 GND

## SMA_1
designator X?, comment SMA  (value not drawn)
footprint SMA_ANGLE
footprint SMA_STAND
footprint SMA-FR
pins: 1, 2

## SW-PB2
designator S?  (value not drawn)
贴片式2脚微动开关
footprint SW-PB2-SMD (贴片2脚微动开关)
pins: 1, 2

## SW-SPDT
designator S?
SPDT Subminiature Toggle Switch, Right Angle Mounting, Vertical Actuation; ComponentLink1Description: Manufacturer Link; ComponentLink1URL: http://www.apem.com
footprint SW-SPDT (侧卧拨动开关)
footprint SW-SPDT_无固定脚 (侧卧拨动开关)
footprint SW-TH_MSK12C02
pins: 1, 2, 3

## TF01-A
designator J?
TF卡卡槽
footprint TF-SMD_TF-01A
pins: 1 DATA2, 2 DATA3, 3 CMD, 4 VDD, 5 CLK, 6 GND, 7 DATA0, 8 DATA1, 9 DETECT, 10 NC, 11 NC, 12 NC, 13 NC

## TP
designator TP?, comment test point  (value not drawn)
footprint TP
pins: 1

## Type-C
designator J?
footprint TYPE-C
pins: 0 SHEILD, A1 GND, A4 VBUS, A5 CC1, A6 D+, A7 D-, A8 SBU1, A9 VBUS, A12 GND, B1 GND, B4 VBUS, B5 CC2, B6 D+, B7 D-, B8 SBU2, B9 VBUS, B12 GND

## TYPE-C-USB3
designator J?, comment U262-241N-4BV64
USB3.0的typec接口; Manufacturer: XKB Connection(中国星坤); Add into BOM: yes; Connector Type: Type-C; Gender: 母; Number of Contacts: 24P; Number of Ports: 1; Current Rating - Power (Max): 5A; Soldering Temperature(Max): 260℃; Symbol: U262-241N-4BV64; Device: U262-241N-4BV64; LCSC Part Name: Type-C 母; Supplier Part: C388660; Manufacturer Part: U262-241N-4BV64; Supplier Footprint: SMD; JLCPCB Part Class: Extended Part; Datasheet: https://atta.szlcsc.com/upload/public/pdf/source/20211015/8B22A47B12BDC5CD319611427B3C1C1B.pdf; Supplier: LCSC; Convert to PCB: yes; Standard: -; Mounting Style: -; Contact Material: 高导铜; Contact Plating: 金; Operating Temperature Range: -40℃~+85℃
footprint USB-C-SMD_TYC-324G
pins: 1, 2, 3, 4, A1 GND, A2 SSTXP1, A3 SSTXN1, A4 VBUS, A5 CC1, A6 DP1, A7 DN1, A8 SBU1, A9 VBUS, A10 SSRXN2, A11 SSRXP2, A12 GND, B1 GND, B2 SSTXP2, B3 SSTXN2, B4 VBUS, B5 CC2, B6 DP2, B7 DN2, B8 SBU2, B9 VBUS, B10 SSRXN1, B11 SSRXP1, B12 GND

## W25Q256
designator U?
footprint WPDFN-8_L8.0-W6.0-P1.27-EP-BL
pins: 1 /CS, 2 DO, 3 /WP, 4 GND, 5 DI, 6 CLK, 7 IO3, 8 VCC, 9 EP

## WS2812C-2020
designator D?
Intelligent control LED integrated light source; Manufacturer_Name: Worldsemi; Geometry.Height: 0.84mm; Manufacturer_Part_Number: WS2812C-2020; Mouser Part Number: *; Mouser Price/Stock: *; Arrow Part Number: *; Arrow Price/Stock: *; Datasheet Link: http://www.world-semi.com/DownLoadFile/139
footprint WS2812C2020
pins: 1 DO, 2 GND, 3 DI, 4 VDD

## XH1.25-3P
designator J?
footprint CONN-TH_3P-P1.25_CAX_1.25-3A
pins: 1 (in), 2, 3

## XTAL-3PIN
designator Y?, comment 12M
贴片晶振
footprint XTAL-3Pin (贴片晶振)
pins: 1, 2, 3

## XTAL-PASS
designator Y?, comment 25MHz
footprint XTAL-5032
footprint CRYSTAL-SMD_4P-L2.0-W1.6-BL
pins: 1 XA, 2 GND, 3 XB, 4 GND

## XTALS
designator Y?, comment SX2M33.333M20F30TNN  value 33.333M
贴片有源晶振
footprint XTAL-7050_L (5*7mm高密度)
footprint XTAL-7050_M (5*7mm低密度)
footprint XTAL-6035
footprint XTAL-5032
footprint XTAL-3225
footprint XTAL-2520 (晶振)
pins: 1 OE/NC, 2 GND, 3 OUT, 4 VDD

## XTALS_1
designator Y?, comment TX0873AA12AE  value 40M
贴片有源晶振
footprint XTAL-7050_L (5*7mm高密度)
footprint XTAL-7050_M (5*7mm低密度)
footprint XTAL-6035
footprint XTAL-5032
footprint XTAL-3225
footprint XTAL-2520 (晶振)
pins: 1 OE/NC, 2 GND, 3 OUT, 4 VDD

## 螺丝孔
designator 1?
footprint 螺丝孔
pins: 1 GND